# Altium footprint library chipfc_libs.PCBLIB: 315 footprints (part 17 of 20)
Each footprint in its own frame and in the unit in brackets; x right, y up, seen from the top. Pads: shape width x height; smd on the part's side, far side on the other; paste and mask are expansions set on the pad; w line width, h text height; cw(c..) or ccw(c..) is an arc to the next point about the centre after c.
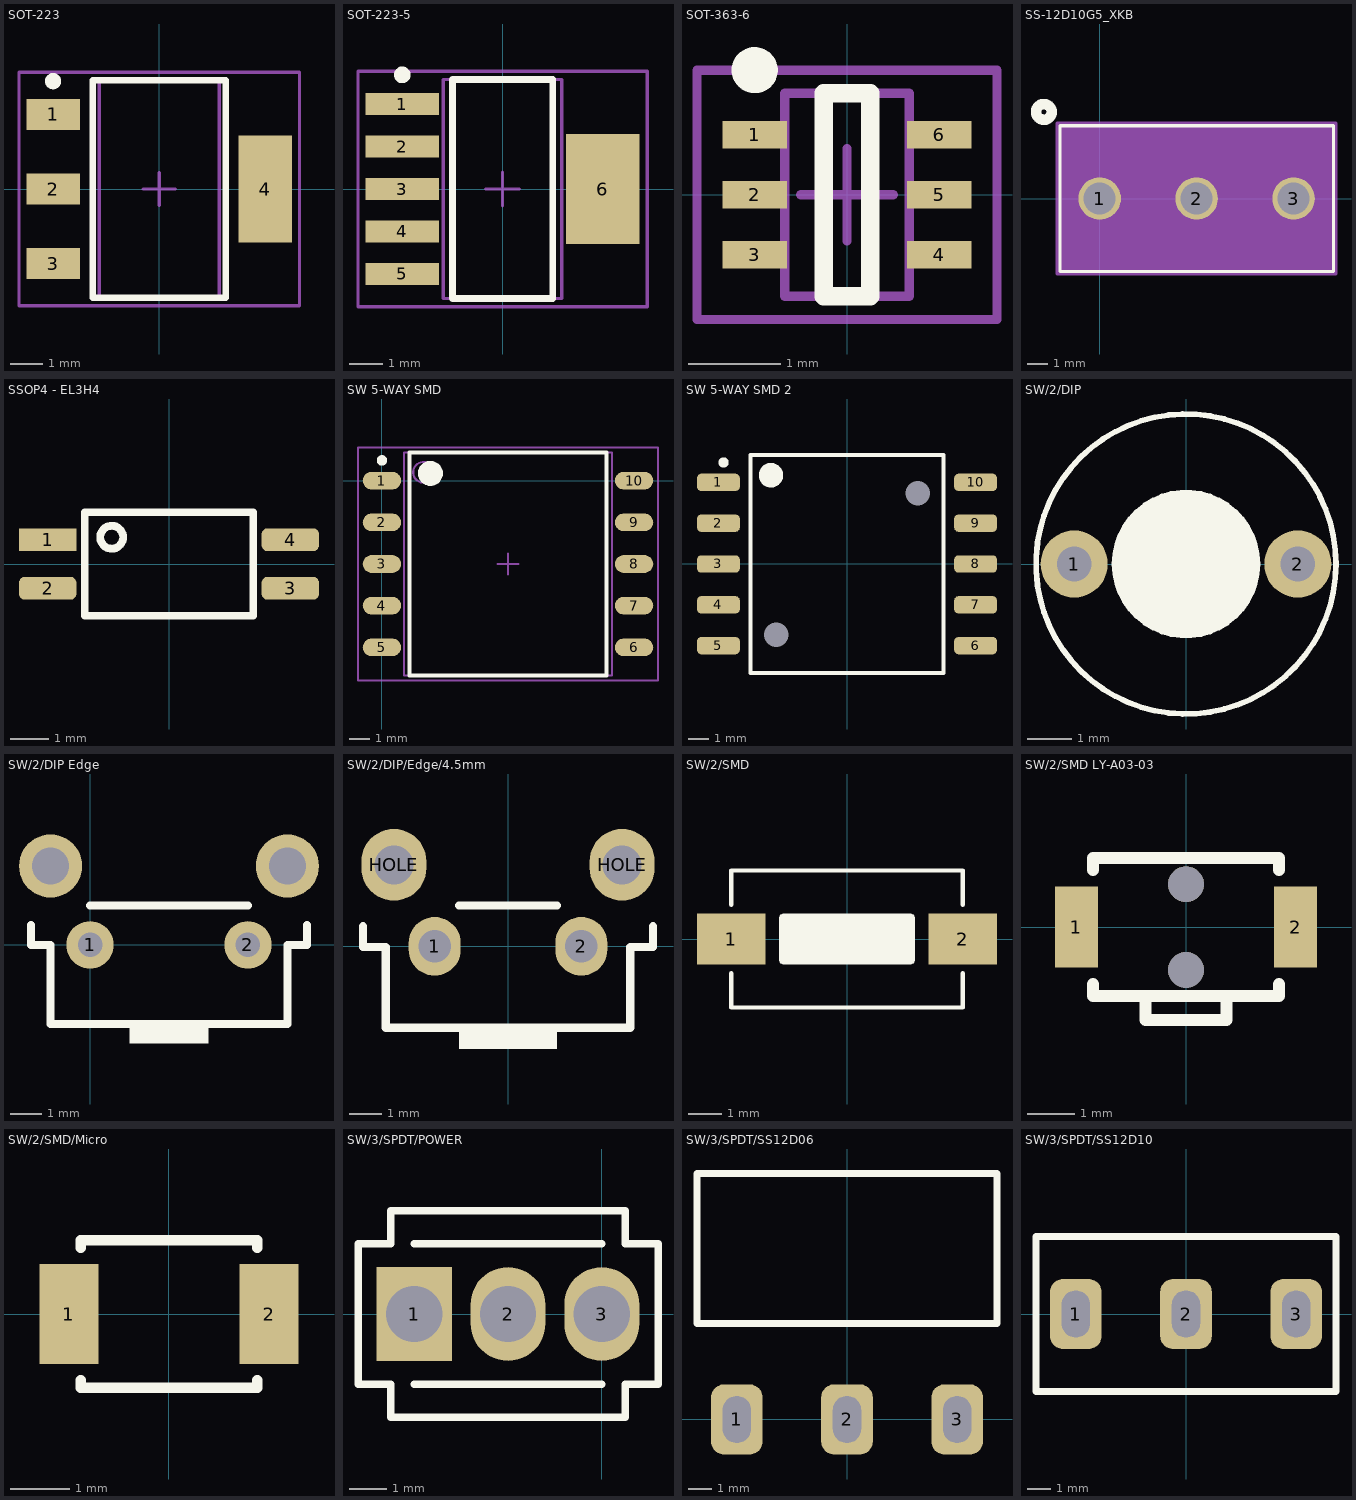
[diagram p16: the footprints below, top view; thin cyan lines are the x and y axes]

## SOT-223 [mm] "SOT223, 4-Leads, Body 6.7x7.3mm (max), Pitch 2.30mm, IPC Medium Density"
height 1.8
pads (4):
  rect 1.65x0.95 smd: 1(-3.275,2.3) 2(-3.275,0) 3(-3.275,-2.3)
  rect 1.65x3.3 smd: 4(3.275,0)
Top Overlay:
  circle w0.25: c-3.275,3.325 r0.125
  lines w0.2: -2.05,-3.35 2.05,-3.35 2.05,3.35 -2.05,3.35 -2.05,-3.35
Mechanical 13:
  lines w0.1: -1.85,-3.35 1.85,-3.35 1.85,3.35 -1.85,3.35 -1.85,-3.35
Mechanical 15:
  lines w0.1: -0.5,0 0.5,0 ; 0,-0.5 0,0.5 ; -4.325,-3.6 4.325,-3.6 4.325,3.6 -4.325,3.6 -4.325,-3.6
3D body "User Library-SOT-223-1.step": height 1.64, standoff -0.01, extent -3.5,-3.25 3.5,3.25

## SOT-223-5 [mm] "SOT223, 6-Leads, Body 6.6x7.3mm (max), Pitch 1.27mm, IPC Medium Density"
height 1.8
pads (6):
  rect 2.2x0.65 smd: 1(-3,2.54) 2(-3,1.27) 3(-3,0) 4(-3,-1.27) 5(-3,-2.54)
  rect 2.2x3.3 smd: 6(3,0)
Top Overlay:
  circle w0.25: c-3,3.415 r0.125
  lines w0.2: -1.5,-3.275 -1.5,3.275 1.5,3.275 1.5,-3.275 -1.5,-3.275
Mechanical 13:
  lines w0.1: -1.775,-3.275 -1.775,3.275 1.775,3.275 1.775,-3.275 -1.775,-3.275
Mechanical 15:
  lines w0.1: -0.5,0 0.5,0 ; 0,-0.5 0,0.5 ; -4.325,-3.525 -4.325,3.525 4.325,3.525 4.325,-3.525 -4.325,-3.525
3D body "User Library-TPS73701DCQ.step": height 1.8, standoff 0, extent -3.683,-3.275 3.577,3.275

## SOT-363-6 [mm] "SOT363 (SC-88, SC-70-6), 6-Leads, Body 2.2x2.2mm (max), Pitch 0.65mm, IPC Medium Density"
height 1.1
pads (6):
  rect 0.7x0.3 smd: 1(-1,0.65) 2(-1,0) 3(-1,-0.65) 4(1,-0.65) 5(1,0) 6(1,0.65)
Top Overlay:
  circle w0.25: c-1,1.35 r0.125
  lines w0.2: -0.25,-1.1 -0.25,1.1 0.25,1.1 0.25,-1.1 -0.25,-1.1
Mechanical 13:
  lines w0.1: -0.675,-1.1 0.675,-1.1 0.675,1.1 -0.675,1.1 -0.675,-1.1
Mechanical 15:
  lines w0.1: -0.5,0 0.5,0 ; 0,-0.5 0,0.5 ; -1.625,-1.35 1.625,-1.35 1.625,1.35 -1.625,1.35 -1.625,-1.35
3D body "User Library-sot363.step": height 1, standoff 0, extent -1.15,-1.05 1.15,1.05

## SS-12D10G5_XKB [mil]
pads (3):
  round 81 / inner round 60 / far side round 81 hole 61 paste-40.5 mask+0: 1(0,0) 2(185,0) 3(370,0)
Top Overlay:
  circle w20: c-106.63,165.35 r15
  lines w6: -76,-139 446,-139 446,139 -76,139 -76,-139
Bottom Overlay:
  circle w20: c-106.63,165.35 r15
Mechanical 13:
  circle w20: c0,75 r15
  lines w1: -71,-134 441,-134 441,134 -71,134 -71,-134
Mechanical 15:
  region: 451,144 -81,144 -81,-144 451,-144
  lines w6: -81,-144 -81,144 451,144 451,-144 -81,-144
3D body "xb-ss-12d10l6.stp": height 409.45, standoff -271.65, extent -70.9,-133.85 440.91,133.87

## SSOP4 - EL3H4 [mm]
pads (4):
  rect 1.5x0.6 smd: 1(-3.175,0.635)
  rrect50% 1.5x0.6 smd: 2(-3.175,-0.635) 3(3.175,-0.635) 4(3.175,0.635)
Top Overlay:
  circle w0.203: c-1.5,0.7 r0.3
  lines w0.2: -2.2,-1.35 2.2,-1.35 2.2,1.35 -2.2,1.35 -2.2,-1.35
3D body "EL3H4-G.step": height 2, standoff 0, extent -3.5,-1.35 3.5,1.35

## SW 5-WAY SMD [mm]
height 5
pads (12):
  oval 1.85x0.85 smd: 1(0,0) 2(0,-2) 3(0,-4) 4(0,-6) 5(0,-8) 6(12.1,-8) 7(12.1,-6) 8(12.1,-4) 9(12.1,-2) 10(12.1,0)
  round 1.2 on Drill Drawing: HOLE(2.835,-7.465) HOLE(9.765,-0.535)
Top Overlay:
  circle w0.6: c2.325,0.35 r0.3
  circle w0.25: c0,0.975 r0.125
  lines w0.2: 1.325,-9.35 10.775,-9.35 10.775,1.35 1.325,1.35 1.325,-9.35
Mechanical 13:
  circle w0.1: c2,0.4 r0.5
  lines w0.1: 1.05,-9.35 11.05,-9.35 11.05,1.35 1.05,1.35 1.05,-9.35
Mechanical 15:
  lines w0.1: 5.55,-4 6.55,-4 ; 6.05,-4.5 6.05,-3.5 ; -1.15,-9.6 13.25,-9.6 13.25,1.6 -1.15,1.6 -1.15,-9.6
3D body: height 5, standoff 0.1, extent 1.05,-9.35 11.05,1.35

## SW 5-WAY SMD 2 [mm]
height 5
pads (12):
  rrect50% 2.1x0.85 smd: 1(-6.3,4) 2(-6.3,2) 3(-6.3,0) 4(-6.3,-2) 5(-6.3,-4) 6(6.3,-4) 7(6.3,-2) 8(6.3,0) 9(6.3,2) 10(6.3,4)
  round 0 hole 1.2: HOLE(-3.465,-3.465) HOLE(3.465,3.465)
Top Overlay:
  circle w0.25: c-6.05,4.975 r0.125
  circle w0.6: c-3.725,4.35 r0.3
  lines w0.2: -4.725,-5.35 -4.725,5.35 4.725,5.35 4.725,-5.35 -4.725,-5.35
3D body: height 5, standoff 0.1, extent -5,-5.35 5,5.35

## SW/2/DIP [mil]
pads (2):
  round 60 / inner round 62 / far side round 60 hole 31: 1(-100,0) 2(100,0)
Top Overlay:
  circle w5: c0,0 r64.03
  circle w5: c0,0 r134.16
  region: 12.61,63.64 12.65,63.62 12.71,63.62 24.78,59.96 24.82,59.93 24.88,59.92 36,53.97 36.04,53.93 36.09,53.92 45.84,45.91 45.87,45.87 45.91,45.84 50.42,40.35 50.42,40.34 50.43,40.34 50.43,40.33 51.07,39.52 51.13,39.48 53.92,36.09 53.93,36.04 53.97,36 59.92,24.88 59.93,24.82 59.96,24.78 63.62,12.71 63.62,12.65 63.64,12.61 64.88,0.05 64.86,0 64.88,-0.05 63.64,-12.61 63.62,-12.65 63.62,-12.71 59.96,-24.78 59.93,-24.82 59.92,-24.88 53.97,-36 53.93,-36.04 53.92,-36.09 45.91,-45.84 45.87,-45.87 45.84,-45.91 36.09,-53.92 36.04,-53.93 36,-53.97 24.88,-59.92 24.82,-59.93 24.78,-59.96 12.71,-63.62 12.65,-63.62 12.61,-63.64 0.05,-64.88 0,-64.86 -0.05,-64.88 -12.61,-63.64 -12.65,-63.62 -12.71,-63.62 -24.78,-59.96 -24.82,-59.93 -24.88,-59.92 -36,-53.97 -36.04,-53.93 -36.09,-53.92 -45.84,-45.91 -45.87,-45.87 -45.91,-45.84 -53.92,-36.09 -53.93,-36.04 -53.97,-36 -59.92,-24.88 -59.93,-24.82 -59.96,-24.78 -63.62,-12.71 -63.62,-12.65 -63.64,-12.61 -64.88,-0.05 -64.86,0 -64.88,0.05 -63.64,12.61 -63.62,12.65 -63.62,12.71 -59.96,24.78 -59.93,24.82 -59.92,24.88 -53.97,36 -53.93,36.04 -53.92,36.09 -45.91,45.84 -45.87,45.87 -45.84,45.91 -36.09,53.92 -36.04,53.93 -36,53.97 -24.88,59.92 -24.82,59.93 -24.78,59.96 -12.71,63.62 -12.65,63.62 -12.61,63.64 -0.05,64.88 0,64.86 0.05,64.88
3D body: height 100, standoff 0, extent -133.96,-134.46 134.98,135.01
3D body: height 150, standoff 0, extent -64.49,-64.87 65,64.87

## SW/2/DIP Edge [mil]
pads (4):
  round 60 / inner round 62 / far side round 60 hole 31: 1(0,0) 2(200,0)
  round 80 hole 47.24: ""(-50,100) ""(250,100)
Top Overlay:
  rectangle: 50,-125 150,-100
  lines w10: -75,25 -75,0 -50,0 -50,-100 250,-100 250,0 275,0 275,25 ; 0,50 200,50

## SW/2/DIP/Edge/4.5mm [mm]
pads (4):
  oval 1.6x1.8 hole 1: 1(-2.25,0) 2(2.25,0)
  oval 2x2.2 hole 1.2: HOLE(-3.5,2.5) HOLE(3.5,2.5)
Top Overlay:
  rectangle: -1.5,-3.15 1.5,-2.5
  lines w0.254: -4.445,0.615 -4.445,-0.02 -3.75,-0.02 -3.75,-2.5 3.75,-2.5 3.75,-0.02 4.445,-0.02 4.445,0.615 ; -1.5,1.25 1.5,1.25
3D body "User Library-SWITCH, TACTILE, RIGHT ANGLE, 12VDC, 50MA, 3_15MM ACTUATOR, WEALTH METAL TC-0240Z.step": height 7, standoff -4, extent -3.7,-3.15 3.7,4.15

## SW/2/SMD [mil]
pads (2):
  rect 80x60 smd: 1(-135,0) 2(135,0)
Top Overlay:
  region: 78.06,28.06 79.33,25 79.33,-25 78.06,-28.06 75,-29.33 -75,-29.33 -78.06,-28.06 -79.33,-25 -79.33,25 -78.06,28.06 -75,29.33 75,29.33
  lines w5: -135,-40 -135,-80 135,-80 135,-40 ; -135,40 -135,80 135,80 135,40
3D body "User Library-TVBU19.step": height 98.43, standoff 0, extent -120,-72.83 120.16,72.83

## SW/2/SMD LY-A03-03 [mm]
pads (4):
  rect 0.9x1.7 smd: 1(-2.3,0) 2(2.3,0)
  round 0.75 hole 0.75: ""(0,-0.9) ""(0,0.9)
Top Overlay:
  lines w0.254: -1.95,-1.2 -1.95,-1.45 1.95,-1.45 1.95,-1.2 ; -1.95,1.2 -1.95,1.45 1.95,1.45 1.95,1.2 ; -0.85,-1.45 -0.85,-1.95 0.85,-1.95 0.85,-1.45

## SW/2/SMD/Micro [mm]
pads (2):
  rect 1x1.7 smd: 1(-1.7,0) 2(1.7,0)
Top Overlay:
  lines w0.178: -1.5,-1.125 -1.5,-1.25 1.5,-1.25 1.5,-1.125 ; -1.5,1.125 -1.5,1.25 1.5,1.25 1.5,1.125
3D body: height 1.2, standoff 0, extent -1.5,-1.25 1.5,1.25
3D body: height 1.6, standoff 0, extent -0.744,-0.748 0.75,0.749

## SW/3/SPDT/POWER [mil]
pads (3):
  rect 80x100 hole 60: 1(-200,0)
  oval 80x100 hole 60: 2(-100,0) 3(0,0)
Top Overlay:
  lines w8: -200,-75 0,-75 ; -200,75 0,75 ; -260,-75 -225,-75 -225,-110 25,-110 25,-75 60,-75 60,75 25,75 25,110 -225,110 -225,75 -260,75 -260,-75

## SW/3/SPDT/SS12D06 [mm]
pads (3):
  rrect50% 2.2x3 hole 1.2 slot 2 at 90 deg: 1(-4.7,0) 2(0,0) 3(4.7,0)
Top Overlay:
  lines w0.3: -6.4,4.1 6.4,4.1 6.4,10.5 -6.4,10.5 -6.4,4.1
3D body "ss-12d06l5r.stp": height 6.6, standoff -2.55, extent -6.475,-0.6 6.475,15.5

## SW/3/SPDT/SS12D10 [mm]
pads (3):
  rrect50% 2.2x3 hole 1.2 slot 2 at 90 deg: 1(-4.7,0) 2(0,0) 3(4.7,0)
Top Overlay:
  lines w0.3: -6.4,-3.3 6.4,-3.3 6.4,3.3 -6.4,3.3 -6.4,-3.3
3D body "41893.stp": height 12.5, standoff -5.4, extent -6.4,-3.3 6.35,3.8